# Altium schematic symbol library BQ76922RSNR.SchLib: 1 symbol
Pins are listed as number, name and electrical type; pins without a type are passive.

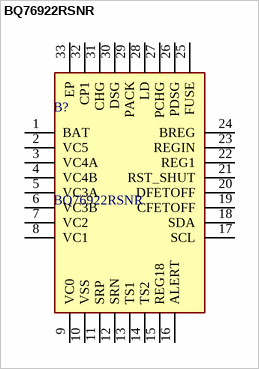
[diagram p0: symbol BQ76922RSNR]

## BQ76922RSNR
designator B?
Battery Management Three-series to five-series cell lithium-ion and lithium-phosphate battery monitor; Manufacturer_Name: Texas Instruments; Geometry.Height: 0.8mm; Mouser Part Number: *; Mouser Price/Stock: *; Manufacturer_Part_Number: BQ76922RSNR; Datasheet Link: https://www.ti.com/lit/ds/symlink/bq76922.pdf
footprint QFN40P400X400X80-33N-D
pins: 1 BAT, 2 VC5, 3 VC4A, 4 VC4B, 5 VC3A, 6 VC3B, 7 VC2, 8 VC1, 9 VC0, 10 VSS, 11 SRP, 12 SRN, 13 TS1, 14 TS2, 15 REG18, 16 ALERT, 17 SCL, 18 SDA, 19 CFETOFF, 20 DFETOFF, 21 RST_SHUT, 22 REG1, 23 REGIN, 24 BREG, 25 FUSE, 26 PDSG, 27 PCHG, 28 LD, 29 PACK, 30 DSG, 31 CHG, 32 CP1, 33 EP